# Altium schematic symbol library CONN,Hdr,2x8 Pin,1.27mm,SMD.Schlib: 1 symbol
Pins are listed as number, name and electrical type; pins without a type are passive.

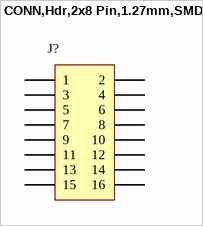
[diagram p0: symbol CONN,Hdr,2x8 Pin,1.27mm,SMD]

## CONN,Hdr,2x8 Pin,1.27mm,SMD
designator J?
pins: 1, 2, 3, 4, 5, 6, 7, 8, 9, 10, 11, 12, 13, 14, 15, 16